# Altium footprint library WR-TBL_Pluggable Connector_5.00mm.PcbLib: 148 footprints (part 1 of 10)
Each footprint in its own frame and in the unit in brackets; x right, y up, seen from the top. Pads: shape width x height; smd on the part's side, far side on the other; paste and mask are expansions set on the pad; w line width, h text height; cw(c..) or ccw(c..) is an arc to the next point about the centre after c.
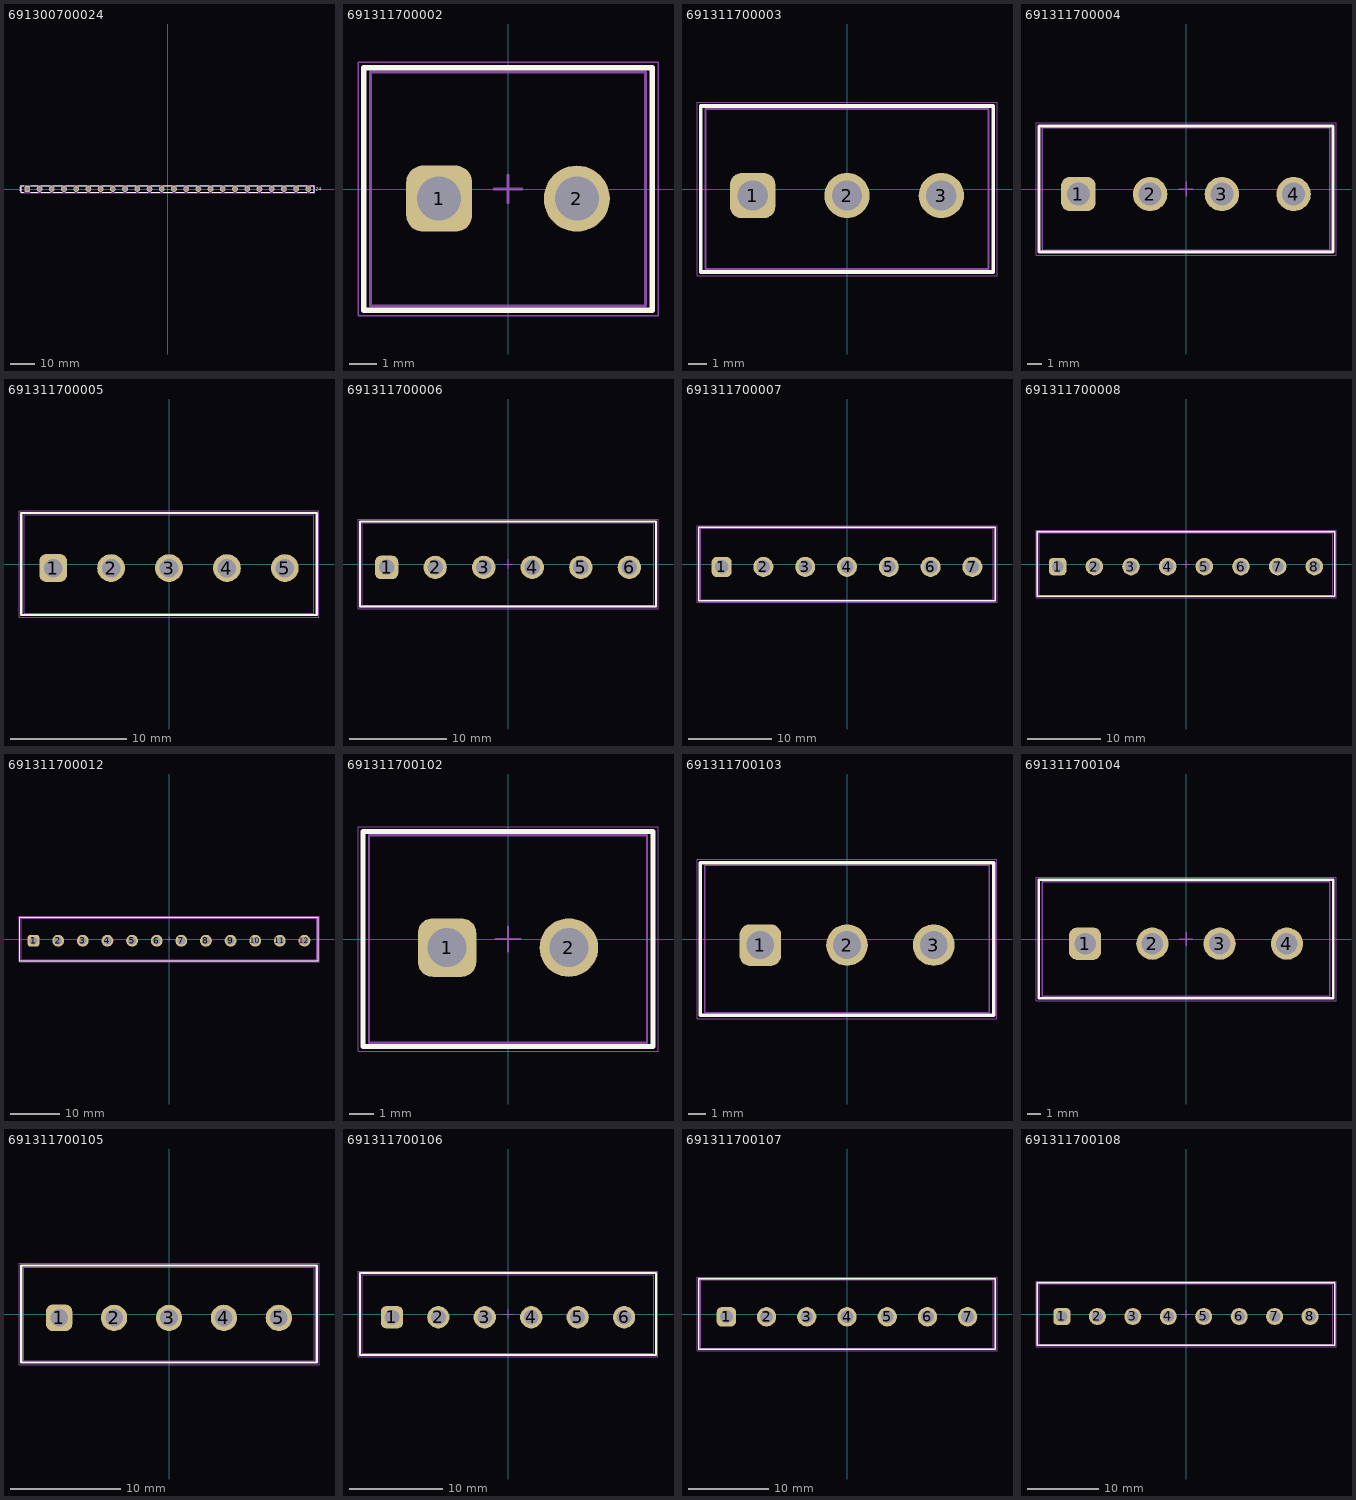
[diagram p0: the footprints below, top view; thin cyan lines are the x and y axes]

## 691300700024 [mm] "5.0mm pin header - 24p"
height 8.95
pads (24):
  rrect50% 2.4x2.4 hole 1.6: 1(-57.5,0)
  round 2.4 hole 1.6: 2(-52.5,0) 3(-47.5,0) 4(-42.5,0) 5(-37.5,0) 6(-32.5,0) 7(-27.5,0) 8(-22.5,0) 9(-17.5,0) 10(-12.5,0) 11(-7.5,0) 12(-2.5,0) 13(2.5,0) 14(7.5,0) 15(12.5,0) 16(17.5,0) 17(22.5,0) 18(27.5,0) 19(32.5,0) 20(37.5,0) 21(42.5,0) 22(47.5,0) 23(52.5,0) 24(57.5,0)
Top Overlay:
  lines w0.2: -59,-1.35 -60,-1.35 -60,1.35 -59,1.35 ; -56,-1.35 -53.2,-1.35 ; -56,1.35 -53.2,1.35 ; -51.8,-1.35 -48.2,-1.35 ; -51.8,1.35 -48.2,1.35 ; -46.8,-1.35 -43.2,-1.35 ; -46.8,1.35 -43.2,1.35 ; -41.8,-1.35 -38.2,-1.35 ; -41.8,1.35 -38.2,1.35 ; -36.8,-1.35 -33.2,-1.35 ; -36.8,1.35 -33.2,1.35 ; -31.8,-1.35 -28.2,-1.35 ; -31.8,1.35 -28.2,1.35 ; -26.8,-1.35 -23.2,-1.35 ; -26.8,1.35 -23.2,1.35 ; -21.8,-1.35 -18.2,-1.35 ; -21.8,1.35 -18.2,1.35 ; -16.8,-1.35 -13.2,-1.35 ; -16.8,1.35 -13.2,1.35 ; -11.8,-1.35 -8.2,-1.35 ; -11.8,1.35 -8.2,1.35 ; -6.8,-1.35 -3.2,-1.35 ; -6.8,1.35 -3.2,1.35 ; -1.8,-1.35 1.8,-1.35 ; -1.8,1.35 1.8,1.35 ; 3.2,-1.35 6.8,-1.35 ; 3.2,1.35 6.8,1.35 ; 8.2,-1.35 11.8,-1.35 ; 8.2,1.35 11.8,1.35 ; 13.2,-1.35 16.8,-1.35 ; 13.2,1.35 16.8,1.35 ; 18.2,-1.35 21.8,-1.35 ; 18.2,1.35 21.8,1.35 ; 23.2,-1.35 26.8,-1.35 ; 23.2,1.35 26.8,1.35 ; 28.2,-1.35 31.8,-1.35 ; 28.2,1.35 31.8,1.35 ; 33.2,-1.35 36.8,-1.35 ; 33.2,1.35 36.8,1.35 ; 38.2,-1.35 41.8,-1.35 ; 38.2,1.35 41.8,1.35 ; 43.2,-1.35 46.8,-1.35 ; 43.2,1.35 46.8,1.35 ; 48.2,-1.35 51.8,-1.35 ; 48.2,1.35 51.8,1.35 ; 53.2,-1.35 56.8,-1.35 ; 53.2,1.35 56.8,1.35 ; 58.2,-1.35 60,-1.35 60,1.35 58.2,1.35
  text "1" at -60.9,-0.7 h1.27
  text "24" at 60.6,-0.7 h1.27
Top Assembly:
  lines w0.1: 60,1.35 -60,1.35 -60,-1.35 60,-1.35 60,1.35 ; 60,1.35 60,1.35
Top Designator:
  text ".Designator" at -3.647,-0.357 h1
Top 3D Body:
  lines w0.1: 60,1.35 60,-1.35 -60,-1.35 -60,1.35 60,1.35 ; 60,1.35 60,1.35
Top Courtyard:
  lines w0.05: -60.2,-1.55 -60.2,1.55 60.2,1.55 60.2,-1.55 -60.2,-1.55
Top Component Center:
  lines w0.1: -0.5,0 0.5,0 ; 0,-0.5 0,0.5
3D body "691300700024.stp": height 9.05, standoff -3.45, extent -60,-1.35 60,1.35

## 691311700002 [mm] "5.00mm - Open Vertical PCB Header - 02p"
height 12
pads (2):
  rrect50% 2.4x2.4 hole 1.6: 1(-2.5,-0.35)
  round 2.4 hole 1.6: 2(2.5,-0.35)
Top Overlay:
  lines w0.2: -5.25,-4.4 -5.25,4.4 5.25,4.4 5.25,-4.4 -5.25,-4.4
Top Assembly:
  lines w0.1: -5.25,-4.4 5.25,-4.4 5.25,4.4 -5.25,4.4 -5.25,-4.4
Top Designator:
  text ".Designator" at -3.647,-0.357 h1
Top 3D Body:
  lines w0.1: -5,-4.25 -5,4.25 5,4.25 5,-4.25 -5,-4.25
Top Courtyard:
  lines w0.05: -5.45,-4.6 -5.45,4.6 5.45,4.6 5.45,-4.6 -5.45,-4.6
Top Component Center:
  lines w0.1: -0.5,0 0.5,0 ; 0,-0.5 0,0.5
3D body "691311700002.stp": height 12.1, standoff -3.9, extent -5,-4.25 5,4.25

## 691311700003 [mm] "5.00mm - Open Vertical PCB Header - 03p"
height 12
pads (3):
  rrect50% 2.4x2.4 hole 1.6: 1(-5,-0.35)
  round 2.4 hole 1.6: 2(0,-0.35) 3(5,-0.35)
Top Overlay:
  lines w0.2: -7.75,-4.4 7.75,-4.4 7.75,4.4 -7.75,4.4 -7.75,-4.4
Top Assembly:
  lines w0.1: -7.75,-4.4 -7.75,4.4 7.75,4.4 7.75,-4.4 -7.75,-4.4
Top Designator:
  text ".Designator" at -3.647,-0.357 h1
Top 3D Body:
  lines w0.1: -7.5,-4.25 7.5,-4.25 7.5,4.25 -7.5,4.25 -7.5,-4.25
Top Courtyard:
  lines w0.05: -7.95,-4.6 7.95,-4.6 7.95,4.6 -7.95,4.6 -7.95,-4.6
Top Component Center:
  lines w0.1: -0.5,0 0.5,0 ; 0,-0.5 0,0.5
3D body "691311700003.stp": height 12.1, standoff -3.9, extent -7.5,-4.25 7.5,4.25

## 691311700004 [mm] "5.00mm - Open Vertical PCB Header - 04p"
height 12
pads (4):
  rrect50% 2.4x2.4 hole 1.6: 1(-7.5,-0.35)
  round 2.4 hole 1.6: 2(-2.5,-0.35) 3(2.5,-0.35) 4(7.5,-0.35)
Top Overlay:
  lines w0.2: -10.25,-4.4 -10.25,4.4 10.25,4.4 10.25,-4.4 -10.25,-4.4
Top Assembly:
  lines w0.1: -10.25,-4.4 10.25,-4.4 10.25,4.4 -10.25,4.4 -10.25,-4.4
Top Designator:
  text ".Designator" at -3.647,-0.357 h1
Top 3D Body:
  lines w0.1: -10,-4.25 -10,4.25 10,4.25 10,-4.25 -10,-4.25
Top Courtyard:
  lines w0.05: -10.45,-4.6 -10.45,4.6 10.45,4.6 10.45,-4.6 -10.45,-4.6
Top Component Center:
  lines w0.1: -0.5,0 0.5,0 ; 0,-0.5 0,0.5
3D body "691311700004.stp": height 12.1, standoff -3.9, extent -10,-4.25 10,4.25

## 691311700005 [mm] "5.00mm - Open Vertical PCB Header - 05p"
height 12
pads (5):
  rrect50% 2.4x2.4 hole 1.6: 1(-10,-0.35)
  round 2.4 hole 1.6: 2(-5,-0.35) 3(0,-0.35) 4(5,-0.35) 5(10,-0.35)
Top Overlay:
  lines w0.2: -12.75,-4.4 -12.75,4.4 12.75,4.4 12.75,-4.4 -12.75,-4.4
Top Assembly:
  lines w0.1: -12.75,-4.4 12.75,-4.4 12.75,4.4 -12.75,4.4 -12.75,-4.4
Top Designator:
  text ".Designator" at -3.647,-0.357 h1
Top 3D Body:
  lines w0.1: -12.5,-4.25 -12.5,4.25 12.5,4.25 12.5,-4.25 -12.5,-4.25
Top Courtyard:
  lines w0.05: -12.95,-4.6 -12.95,4.6 12.95,4.6 12.95,-4.6 -12.95,-4.6
Top Component Center:
  lines w0.1: -0.5,0 0.5,0 ; 0,-0.5 0,0.5
3D body "691311700005.stp": height 12.1, standoff -3.9, extent -12.5,-4.25 12.5,4.25

## 691311700006 [mm] "5.00mm - Open Vertical PCB Header - 06p"
height 12
pads (6):
  rrect50% 2.4x2.4 hole 1.6: 1(-12.5,-0.35)
  round 2.4 hole 1.6: 2(-7.5,-0.35) 3(-2.5,-0.35) 4(2.5,-0.35) 5(7.5,-0.35) 6(12.5,-0.35)
Top Overlay:
  lines w0.2: -15.25,-4.4 15.25,-4.4 15.25,4.4 -15.25,4.4 -15.25,-4.4
Top Assembly:
  lines w0.1: -15.25,-4.4 -15.25,4.4 15.25,4.4 15.25,-4.4 -15.25,-4.4
Top Designator:
  text ".Designator" at -3.647,-0.357 h1
Top 3D Body:
  lines w0.1: -15,-4.25 15,-4.25 15,4.25 -15,4.25 -15,-4.25
Top Courtyard:
  lines w0.05: -15.45,-4.6 15.45,-4.6 15.45,4.6 -15.45,4.6 -15.45,-4.6
Top Component Center:
  lines w0.1: -0.5,0 0.5,0 ; 0,-0.5 0,0.5
3D body "691311700006.stp": height 12.1, standoff -3.9, extent -15,-4.25 15,4.25

## 691311700007 [mm] "5.00mm - Open Vertical PCB Header - 07p"
height 12
pads (7):
  rrect50% 2.4x2.4 hole 1.6: 1(-15,-0.35)
  round 2.4 hole 1.6: 2(-10,-0.35) 3(-5,-0.35) 4(0,-0.35) 5(5,-0.35) 6(10,-0.35) 7(15,-0.35)
Top Overlay:
  lines w0.2: -17.75,-4.4 17.75,-4.4 17.75,4.4 -17.75,4.4 -17.75,-4.4
Top Assembly:
  lines w0.1: -17.75,-4.4 -17.75,4.4 17.75,4.4 17.75,-4.4 -17.75,-4.4
Top Designator:
  text ".Designator" at -3.647,-0.357 h1
Top 3D Body:
  lines w0.1: -17.5,-4.25 17.5,-4.25 17.5,4.25 -17.5,4.25 -17.5,-4.25
Top Courtyard:
  lines w0.05: -17.95,-4.6 17.95,-4.6 17.95,4.6 -17.95,4.6 -17.95,-4.6
Top Component Center:
  lines w0.1: -0.5,0 0.5,0 ; 0,-0.5 0,0.5
3D body "691311700007.stp": height 12.1, standoff -3.9, extent -17.5,-4.25 17.5,4.25

## 691311700008 [mm] "5.00mm - Open Vertical PCB Header - 08p"
height 12
pads (8):
  rrect50% 2.4x2.4 hole 1.6: 1(-17.5,-0.35)
  round 2.4 hole 1.6: 2(-12.5,-0.35) 3(-7.5,-0.35) 4(-2.5,-0.35) 5(2.5,-0.35) 6(7.5,-0.35) 7(12.5,-0.35) 8(17.5,-0.35)
Top Overlay:
  lines w0.2: -20.25,-4.4 20.25,-4.4 20.25,4.4 -20.25,4.4 -20.25,-4.4
Top Assembly:
  lines w0.1: -20.25,-4.4 -20.25,4.4 20.25,4.4 20.25,-4.4 -20.25,-4.4
Top Designator:
  text ".Designator" at -3.647,-0.357 h1
Top 3D Body:
  lines w0.1: -20,-4.25 20,-4.25 20,4.25 -20,4.25 -20,-4.25
Top Courtyard:
  lines w0.05: -20.45,-4.6 20.45,-4.6 20.45,4.6 -20.45,4.6 -20.45,-4.6
Top Component Center:
  lines w0.1: -0.5,0 0.5,0 ; 0,-0.5 0,0.5
3D body "691311700008.stp": height 12.1, standoff -3.9, extent -20,-4.25 20,4.25

## 691311700012 [mm] "5.00mm - Open Vertical PCB Header - 12p"
height 12
pads (12):
  rrect50% 2.4x2.4 hole 1.6: 1(-27.5,-0.35)
  round 2.4 hole 1.6: 2(-22.5,-0.35) 3(-17.5,-0.35) 4(-12.5,-0.35) 5(-7.5,-0.35) 6(-2.5,-0.35) 7(2.5,-0.35) 8(7.5,-0.35) 9(12.5,-0.35) 10(17.5,-0.35) 11(22.5,-0.35) 12(27.5,-0.35)
Top Overlay:
  lines w0.2: -30.25,-4.4 -30.25,4.4 30.25,4.4 30.25,-4.4 -30.25,-4.4
Top Assembly:
  lines w0.1: -30.25,-4.4 30.25,-4.4 30.25,4.4 -30.25,4.4 -30.25,-4.4
Top Designator:
  text ".Designator" at -3.647,-0.357 h1
Top 3D Body:
  lines w0.1: -30,-4.25 -30,4.25 30,4.25 30,-4.25 -30,-4.25
Top Courtyard:
  lines w0.05: -30.45,-4.6 -30.45,4.6 30.45,4.6 30.45,-4.6 -30.45,-4.6
Top Component Center:
  lines w0.1: -0.5,0 0.5,0 ; 0,-0.5 0,0.5
3D body "691311700012.stp": height 12.1, standoff -3.9, extent -30,-4.25 30,4.25

## 691311700102 [mm] "5.00mm - PCB Vertical Closed - 02p"
height 12
pads (2):
  rrect50% 2.4x2.4 hole 1.6: 1(-2.5,-0.35)
  round 2.4 hole 1.6: 2(2.5,-0.35)
Top Overlay:
  lines w0.2: -5.95,-4.4 5.95,-4.4 5.95,4.4 -5.95,4.4 -5.95,-4.4
Top Assembly:
  lines w0.1: -5.95,-4.4 -5.95,4.4 5.95,4.4 5.95,-4.4 -5.95,-4.4
Top Designator:
  text ".Designator" at -3.647,-0.357 h1
Top 3D Body:
  lines w0.1: -5.7,-4.25 5.7,-4.25 5.7,4.25 -5.7,4.25 -5.7,-4.25
Top Courtyard:
  lines w0.05: -6.15,-4.6 -6.15,4.6 6.15,4.6 6.15,-4.6 -6.15,-4.6
Top Component Center:
  lines w0.1: -0.5,0 0.5,0 ; 0,-0.5 0,0.5
3D body "691311700102.stp": height 12.1, standoff -3.9, extent -5.7,-4.25 5.7,4.25

## 691311700103 [mm] "5.00mm - PCB Vertical Closed - 03p"
height 12
pads (3):
  rrect50% 2.4x2.4 hole 1.6: 1(-5,-0.35)
  round 2.4 hole 1.6: 2(0,-0.35) 3(5,-0.35)
Top Overlay:
  lines w0.2: -8.45,-4.4 8.45,-4.4 8.45,4.4 -8.45,4.4 -8.45,-4.4
Top Assembly:
  lines w0.1: -8.45,-4.4 -8.45,4.4 8.45,4.4 8.45,-4.4 -8.45,-4.4
Top Designator:
  text ".Designator" at -3.647,-0.357 h1
Top 3D Body:
  lines w0.1: -8.2,-4.25 8.2,-4.25 8.2,4.25 -8.2,4.25 -8.2,-4.25
Top Courtyard:
  lines w0.05: -8.65,-4.6 -8.65,4.6 8.65,4.6 8.65,-4.6 -8.65,-4.6
Top Component Center:
  lines w0.1: -0.5,0 0.5,0 ; 0,-0.5 0,0.5
3D body "691311700103.stp": height 12.1, standoff -3.9, extent -8.2,-4.25 8.2,4.25

## 691311700104 [mm] "5.00mm - PCB Vertical Closed - 04p"
height 12
pads (4):
  rrect50% 2.4x2.4 hole 1.6: 1(-7.5,-0.35)
  round 2.4 hole 1.6: 2(-2.5,-0.35) 3(2.5,-0.35) 4(7.5,-0.35)
Top Overlay:
  lines w0.2: -10.95,-4.4 -10.95,4.4 10.95,4.4 10.95,-4.4 -10.95,-4.4
Top Assembly:
  lines w0.1: -10.95,-4.4 10.95,-4.4 10.95,4.4 -10.95,4.4 -10.95,-4.4
Top Designator:
  text ".Designator" at -3.647,-0.357 h1
Top 3D Body:
  lines w0.1: -10.7,-4.25 -10.7,4.25 10.7,4.25 10.7,-4.25 -10.7,-4.25
Top Courtyard:
  lines w0.05: -11.15,-4.6 11.15,-4.6 11.15,4.6 -11.15,4.6 -11.15,-4.6
Top Component Center:
  lines w0.1: -0.5,0 0.5,0 ; 0,-0.5 0,0.5
3D body "691311700104.stp": height 12.1, standoff -3.9, extent -10.7,-4.25 10.7,4.25

## 691311700105 [mm] "5.00mm - PCB Vertical Closed - 05p"
height 12
pads (5):
  rrect50% 2.4x2.4 hole 1.6: 1(-10,-0.35)
  round 2.4 hole 1.6: 2(-5,-0.35) 3(0,-0.35) 4(5,-0.35) 5(10,-0.35)
Top Overlay:
  lines w0.2: -13.45,-4.4 13.45,-4.4 13.45,4.4 -13.45,4.4 -13.45,-4.4
Top Assembly:
  lines w0.1: -13.45,-4.4 -13.45,4.4 13.45,4.4 13.45,-4.4 -13.45,-4.4
Top Designator:
  text ".Designator" at -3.647,-0.357 h1
Top 3D Body:
  lines w0.1: -13.2,-4.25 13.2,-4.25 13.2,4.25 -13.2,4.25 -13.2,-4.25
Top Courtyard:
  lines w0.05: -13.65,-4.6 -13.65,4.6 13.65,4.6 13.65,-4.6 -13.65,-4.6
Top Component Center:
  lines w0.1: -0.5,0 0.5,0 ; 0,-0.5 0,0.5
3D body "691311700105.stp": height 12.1, standoff -3.9, extent -13.2,-4.25 13.2,4.25

## 691311700106 [mm] "5.00mm - PCB Vertical Closed - 06p"
height 12
pads (6):
  rrect50% 2.4x2.4 hole 1.6: 1(-12.5,-0.35)
  round 2.4 hole 1.6: 2(-7.5,-0.35) 3(-2.5,-0.35) 4(2.5,-0.35) 5(7.5,-0.35) 6(12.5,-0.35)
Top Overlay:
  lines w0.2: -15.95,-4.4 -15.95,4.4 15.95,4.4 15.95,-4.4 -15.95,-4.4
Top Assembly:
  lines w0.1: -15.95,-4.4 15.95,-4.4 15.95,4.4 -15.95,4.4 -15.95,-4.4
Top Designator:
  text ".Designator" at -3.647,-0.357 h1
Top 3D Body:
  lines w0.1: -15.7,-4.25 -15.7,4.25 15.7,4.25 15.7,-4.25 -15.7,-4.25
Top Courtyard:
  lines w0.05: -16.15,-4.6 16.15,-4.6 16.15,4.6 -16.15,4.6 -16.15,-4.6
Top Component Center:
  lines w0.1: -0.5,0 0.5,0 ; 0,-0.5 0,0.5
3D body "691311700106.stp": height 12.1, standoff -3.9, extent -15.7,-4.25 15.7,4.25

## 691311700107 [mm] "5.00mm - PCB Vertical Closed - 07p"
height 12
pads (7):
  rrect50% 2.4x2.4 hole 1.6: 1(-15,-0.35)
  round 2.4 hole 1.6: 2(-10,-0.35) 3(-5,-0.35) 4(0,-0.35) 5(5,-0.35) 6(10,-0.35) 7(15,-0.35)
Top Overlay:
  lines w0.2: -18.45,-4.4 -18.45,4.4 18.45,4.4 18.45,-4.4 -18.45,-4.4
Top Assembly:
  lines w0.1: -18.45,-4.4 18.45,-4.4 18.45,4.4 -18.45,4.4 -18.45,-4.4
Top Designator:
  text ".Designator" at -3.647,-0.357 h1
Top 3D Body:
  lines w0.1: -18.2,-4.25 -18.2,4.25 18.2,4.25 18.2,-4.25 -18.2,-4.25
Top Courtyard:
  lines w0.05: -18.65,-4.6 18.65,-4.6 18.65,4.6 -18.65,4.6 -18.65,-4.6
Top Component Center:
  lines w0.1: -0.5,0 0.5,0 ; 0,-0.5 0,0.5
3D body "691311700107.stp": height 12.1, standoff -3.9, extent -18.2,-4.25 18.2,4.25

## 691311700108 [mm] "5.00mm - PCB Vertical Closed - 08p"
height 12
pads (8):
  rrect50% 2.4x2.4 hole 1.6: 1(-17.5,-0.35)
  round 2.4 hole 1.6: 2(-12.5,-0.35) 3(-7.5,-0.35) 4(-2.5,-0.35) 5(2.5,-0.35) 6(7.5,-0.35) 7(12.5,-0.35) 8(17.5,-0.35)
Top Overlay:
  lines w0.2: -20.95,-4.4 -20.95,4.4 20.95,4.4 20.95,-4.4 -20.95,-4.4
Top Assembly:
  lines w0.1: -20.95,-4.4 20.95,-4.4 20.95,4.4 -20.95,4.4 -20.95,-4.4
Top Designator:
  text ".Designator" at -3.647,-0.357 h1
Top 3D Body:
  lines w0.1: -20.7,-4.25 -20.7,4.25 20.7,4.25 20.7,-4.25 -20.7,-4.25
Top Courtyard:
  lines w0.05: -21.15,-4.6 21.15,-4.6 21.15,4.6 -21.15,4.6 -21.15,-4.6
Top Component Center:
  lines w0.1: -0.5,0 0.5,0 ; 0,-0.5 0,0.5
3D body "691311700108.stp": height 12.1, standoff -3.9, extent -20.7,-4.25 20.7,4.25